# Altium integrated library Diodes.IntLib: 11 symbols
Pins are listed as number, name and electrical type; pins without a type are passive.

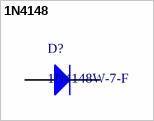
[diagram p0: symbol 1N4148]

## 1N4148
designator D?, comment 1N4148W-7-F
Fast Switching Diode, 100 V, 0.15 A, -65 to 150 degC, 2-Pin?SOD123, RoHS, Tape and Reel; Recovery Time: 4ns; Brand: DiodesIncorporated; Unit Weight: 0.000353oz; Max Surge Current: 2A; Peak Reverse Voltage: 100V; Ir - Reverse Current: 1uA; Vf - Forward Voltage: 1.25V; Configuration: Single; If - Forward Current: 0.15A; Product Category: Diodes-GeneralPurpose,Power,Switching; Operating Temperature Range: -65Cto+150C; Packaging: Reel; Manufacturer URL: http://www.diodes.com/; Maximum Operating Temperature: +150C; Height: 1.25mm; Minimum Operating Temperature: -65C; Product: SwitchingDiodes; Package URL: http://www.diodes.com/datasheets/ds18004.pdf; Type: SwitchingDiode; Package Reference: SOD123-2; Width: 1.7mm; Datasheet URL: http://www.farnell.com/datasheets/1915529.pdf; Datasheet Version: Rev. 24-2, 10/2013; Series: 1N4148; Factory Pack Quantity: 3000; Length: 2.85mm; RoHS: True; Manufacturer: DiodesIncorporated; Mounting Style: SMD/SMT; Package / Case: SOD-123
footprint DIOD-SOD123-2_V (SOD123, 2-Leads, Body 2.7x1.55mm, Height 1.45mm)
pins: 1 K, 2 A


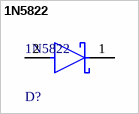
[diagram p1: symbol 1N5822]

## 1N5822
designator D?
DIODE SCHOTTKY 40V 3A DO201AD; Manufacturer: STMicroelectronics; Max Junction Temp: +150°C; Peak Reverse Current: 2mA; Max Surge Forward Current: 80A; Temperature Range High: +150°C; Automotive: No; RoHS: TRUE; ComponentLink2Description: Datasheet; Manufacturer Part Number: 1N5822; Lead Free: Yes; Octopart: https://octopart.com/1n5822-stmicroelectronics-323225; Device Class L2: Diodes; Max Repetitive Reverse Voltage: 40V; Temperature: to +150°C; Height: 5.3mm; Category: Diode; Digikey Description: DIODE SCHOTTKY 40V 3A DO201AD; ComponentLink2URL: https://www.st.com/resource/en/datasheet/1n5822.pdf; Device Class L3: Schottky Diodes; Device Class L1: Discrete Semiconductors; Forward Current: 3A; Mouser Description: Schottky Diodes & Rectifiers Vr/40V Io/3A BULK; Package: DO-201AD
footprint FP-DO-201AD-MFG
pins: 1 C, 2 A


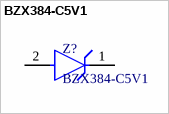
[diagram p2: symbol BZX384-C5V1]

## BZX384-C5V1
designator Z?
footprint FP-SOD323-MFG
footprint BZX384-SOD323-IPC_A
footprint BZX384-SOD323-IPC_B
footprint BZX384-SOD323-IPC_C
pins: 1 C, 2 A


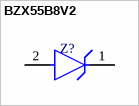
[diagram p3: symbol BZX55B8V2]

## BZX55B8V2
designator Z?  (value not drawn)
footprint BZX55B8V2
pins: 1 C, 2 A


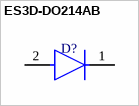
[diagram p4: symbol ES3D-DO214AB]

## ES3D-DO214AB
designator D?  (value not drawn)
ES3D-DO214AB
footprint DO214-AB
pins: 1 C, 2 A


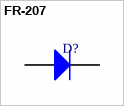
[diagram p5: symbol FR-207]

## FR-207
designator D?  (value not drawn)
FR207
footprint FR207
pins: 1 K, 2 A


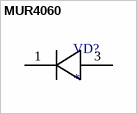
[diagram p6: symbol MUR4060]

## MUR4060
designator VD?
footprint TO-247-2
footprint TO-247-2_Vishay
pins: 1, 3


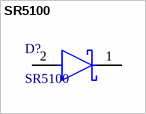
[diagram p7: symbol SR5100]

## SR5100
designator D?
footprint SR5100(DO-201AD
pins: 1 C, 2 A


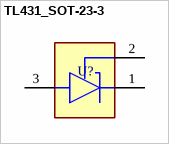
[diagram p8: symbol TL431_SOT-23-3]

## TL431_SOT-23-3
designator U?, comment TL431  (value not drawn)
TL431_SOT-23-3
footprint TL431_SOT-23-3(A)
footprint TL431_SOT-23-3(B)
footprint TL431_SOT-23-3(C)
footprint TL431_SOT-23-3(MGF)
pins: 1 C, 2 REF, 3 A


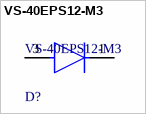
[diagram p9: symbol VS-40EPS12-M3]

## VS-40EPS12-M3
designator D?
DIODE GP 1.2KV 40A TO247AC; Series: -; Case/Package: TO-247-2; Mount: Through Hole; Max Reverse Voltage (DC): 1.2kV; RoHS Compliant: Yes; Packaging: Rail/Tube; Average Rectified Current: 40A
footprint TO-247-2_Vishay
footprint TO-247-2
pins: 1 C, 3 A


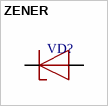
[diagram p10: symbol ZENER]

## ZENER
designator VD?
footprint DO-35
footprint DO-017AA
pins: 1 C, 2 A